# Altium schematic symbol library 1121.SchLib: 1 symbol
Pins are listed as number, name and electrical type; pins without a type are passive.

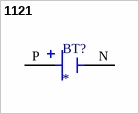
[diagram p0: symbol 1121]

## 1121
designator BT?
THM Holder for 20700 & 21700 Cell w/ coil spring; MF: Keystone Electronics; MP: 1121; SnapEDA_Link: https://www.snapeda.com/parts/1121/Keystone/view-part/?ref=snap; Package: None; Value: *; Check_prices: https://www.snapeda.com/parts/1121/Keystone/view-part/?ref=eda
footprint BAT_1121
pins: N NEG, P POS